# Altium footprint library Master.PcbLib: 178 footprints (part 9 of 12)
Each footprint in its own frame and in the unit in brackets; x right, y up, seen from the top. Pads: shape width x height; smd on the part's side, far side on the other; paste and mask are expansions set on the pad; w line width, h text height; cw(c..) or ccw(c..) is an arc to the next point about the centre after c.
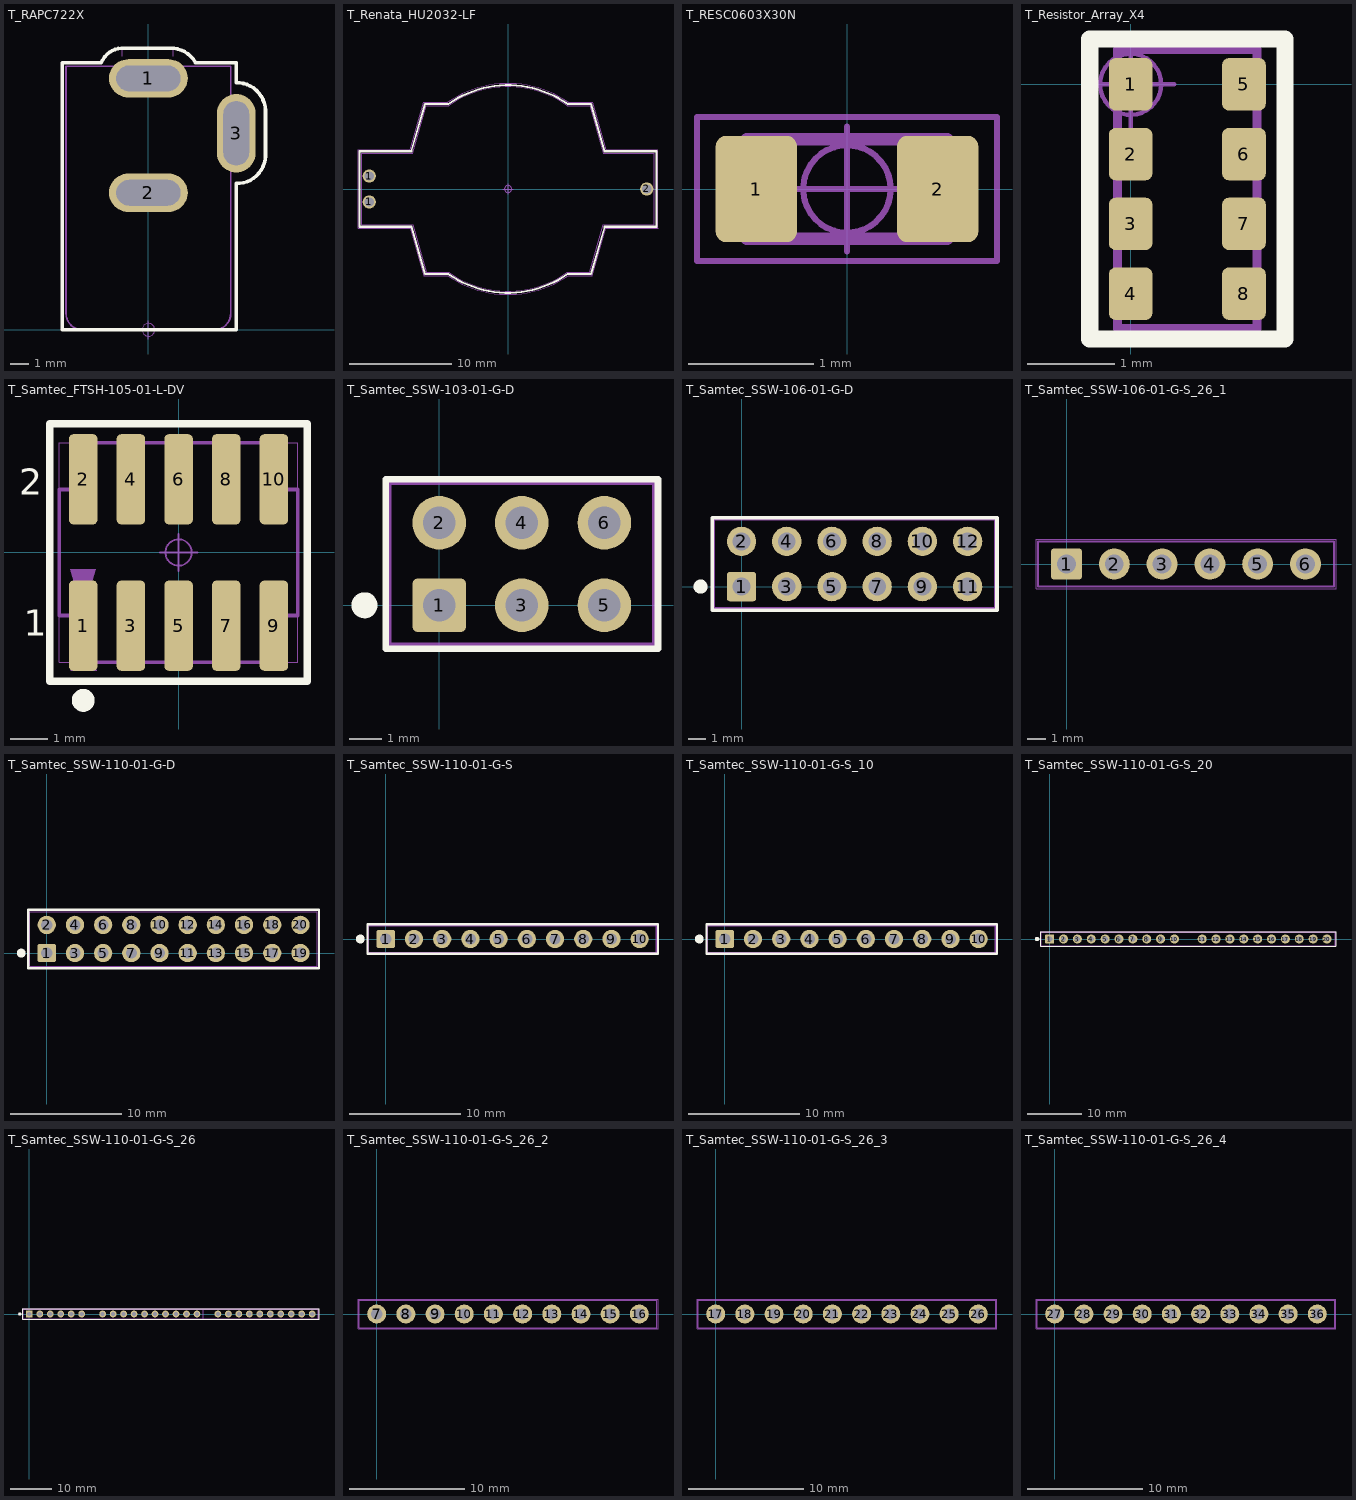
[diagram p8: the footprints below, top view; thin cyan lines are the x and y axes]

## T_RAPC722X [mm] "Connector, 2.1mm (Dia), 5.5mm(Dia), Round Power Socket"
height 10.7
pads (3):
  oval 4.3x2.1 hole 1.4 slot 3.5 at 0 deg: 1(0,13.74) 2(0,7.49)
  oval 2.1x4.3 hole 1.4 slot 3.5 at 90 deg: 3(4.8,10.74)
Top Overlay:
  lines w0.2: 1.196,15.393 -1.3,15.393 ccw(c-1.385,14.115) -2.569,14.6 -4.7,14.6 -4.7,0 4.79,0 4.79,8 ccw(c4.843,9.553) 6.396,9.499 6.396,11.996 ccw(c4.841,11.945) 4.79,13.5 4.79,14.59 4.78,14.6 2.569,14.6 ccw(c1.234,13.866) 1.2,15.388
Top Component Outline:
  lines w0.05: -1.332,15.393 1.164,15.393 ; -1.332,15.394 ccw(c-1.384,14.115) -2.568,14.6 -4.7,14.6 -4.7,0 4.8,0 4.8,8 ccw(c4.843,9.553) 6.396,9.499 6.396,11.996 ccw(c4.841,11.945) 4.8,13.5 4.8,14.6 2.568,14.6 ; 1.169,15.388 cw(c1.203,13.866) 2.537,14.6
Top 3D Body:
  lines w0.001: -1.432,14.95 -1.432,15.4 ; -1.4,13.95 -1.4,14.4 -4.5,14.4 -4.5,0.9 ccw(c-3.6,0.9) -3.6,0 3.6,0 ; 1.368,14.95 1.368,15.4 ; 1.4,13.95 1.4,14.4 4.5,14.4 4.5,0.9 cw(c3.6,0.9) 3.6,0
Top Component Center:
  circle w0.05: c0,0 r0.35
  lines w0.05: -0.5,0 0.5,0 ; 0,-0.5 0,0.5
Top Dimensions:
  lines w0.1: -4.5,0.9 ccw(c-3.6,0.9) -3.6,0 3.6,0 ccw(c3.6,0.9) 4.5,0.9 4.5,14.4 -4.5,14.4 -4.5,0.9
Top Assembly:
  text ".Designator" at -1.5,10.5 h0.75
3D body: height 10.7, standoff 0, extent -4.5,0 4.5,14.4
3D body: height 4, standoff -3.7, extent 4.5,9.45 4.7,11.85
3D body: height 4, standoff -3.7, extent -1.2,7.55 1.2,7.75
3D body: height 4, standoff -3.7, extent -1.4,13.55 1.4,13.75
3D body: height 9.59, standoff 3.21, extent -3.2,0 3.175,2
3D body: height 7.4, standoff 5.4, extent -1,0 0.992,2

## T_Renata_HU2032-LF [mm]
pads (3):
  round 1.3 hole 0.9: 1(-13.6,-1.27) 1(-13.6,1.27) 2(13.6,0)
Top Overlay:
  lines w0.2: -5.86,8.331 -8.133,8.331 -9.483,3.7 -14.55,3.7 -14.55,-3.7 ; -5.845,-8.331 -8.135,-8.331 -9.48,-3.7 -14.55,-3.7 ; -5.843,-8.33 ccw(c0,0) 5.839,-8.334 ; -5.839,8.334 cw(c0,0) 5.843,8.33 ; 5.845,8.331 8.135,8.331 9.48,3.7 14.55,3.7 ; 5.86,-8.331 8.133,-8.331 9.483,-3.7 14.55,-3.7 14.55,3.7 ; -14.55,-3.7 -14.55,-3.7 ; 14.55,3.7 14.55,3.7
Top Component Outline:
  lines w0.05: -14.702,-3.851 -14.702,3.849 -9.599,3.849 ; -14.7,-3.85 -9.599,-3.85 -8.252,-8.489 -5.895,-8.489 ccw(c0,0) 5.895,-8.489 8.252,-8.489 ; -9.599,3.849 -8.252,8.489 ; -8.252,8.489 -5.895,8.489 cw(c0,0) 5.895,8.489 8.252,8.489 9.599,3.85 14.7,3.85 14.7,-3.85 ; 8.252,-8.489 9.599,-3.849 ; 9.599,-3.849 14.702,-3.849
Top 3D Body:
  lines w0.01: -14.35,-3.5 -9.35,-3.5 -8,-8.15 -5.818,-8.15 ccw(c0,0) 5.818,-8.15 8,-8.15 9.35,-3.5 14.35,-3.5 14.35,3.5 9.35,3.5 8,8.15 5.818,8.15 ccw(c0,0) -5.818,8.15 -8,8.15 -9.35,3.5 -14.35,3.5 -14.35,-3.5
Top Component Center:
  circle w0.05: c0,0 r0.35
  lines w0.05: -0.5,0 0.5,0 ; 0,-0.5 0,0.5
Top Dimensions:
  lines w0.1: -14.35,-3.5 -9.35,-3.5 -8,-8.15 -5.818,-8.15 ccw(c0,0) 5.818,-8.15 8,-8.15 9.35,-3.5 14.35,-3.5 14.35,3.5 9.35,3.5 8,8.15 5.818,8.15 ccw(c0,0) -5.818,8.15 -8,8.15 -9.35,3.5 -14.35,3.5 -14.35,-3.5
Top Assembly:
  text ".Designator" at -1.75,10.7 h0.75
3D body "CircuitWorks-BATT HOLDER DIP (SMTU2032-LF).STEP": height 5.4, standoff -2, extent -14.25,-8.05 14.25,8.05
3D body "User Library-CR 2032 Lithium Cell.STEP": height 4.5, standoff 1.3, extent -10,-10 10,10

## T_RESC0603X30N [mm]
pads (2):
  rrect25% 0.65x0.85 smd: 1(-0.725,0) 2(0.725,0)
Top Component Outline:
  lines w0.05: -1.2,-0.575 1.2,-0.575 1.2,0.575 -1.2,0.575 -1.2,-0.575
Top 3D Body:
  lines w0.001: -0.8,-0.4 0.8,-0.4 0.8,0.4 -0.8,0.4 -0.8,-0.4
Top Component Center:
  circle w0.05: c0,0 r0.35
  lines w0.05: -0.5,0 0.5,0 ; 0,-0.5 0,0.5
Top Dimensions:
  lines w0.1: -0.8,-0.4 0.8,-0.4 0.8,0.4 -0.8,0.4 -0.8,-0.4
Top Assembly:
  text ".Designator" at -1.2,0.8 h0.75
3D body "User Library-RES_1609-0603.step": height 0.56, standoff 0, extent -0.85,-0.4 0.85,0.4

## T_Resistor_Array_X4 [mm]
pads (8):
  rrect30% 0.5x0.6 smd: 1(0,0) 2(0,-0.8) 3(0,-1.6) 4(0,-2.4) 5(1.3,0) 6(1.3,-0.8) 7(1.3,-1.6) 8(1.3,-2.4)
Top Overlay:
  lines w0.2: -0.47,-2.92 -0.47,0.52 1.77,0.52 1.77,-2.92 -0.47,-2.92
Top Component Outline:
  lines w0.05: -0.47,-2.92 -0.47,0.52 1.77,0.52 1.77,-2.92 -0.47,-2.92
Top 3D Body:
  lines w0.001: -0.15,-2.8 -0.15,0.4 1.45,0.4 1.45,-2.8 -0.15,-2.8
Top Component Center:
  circle w0.05: c0,0 r0.35
  lines w0.05: -0.5,0 0.5,0 ; 0,-0.5 0,0.5
Top Dimensions:
  lines w0.1: -0.15,-2.8 -0.15,0.4 1.45,0.4 1.45,-2.8 -0.15,-2.8
Top Assembly:
  text ".Designator" at -1,0.8 h0.75
3D body "User Library-R-0603-Array-4-1.STEP": height 0.51, standoff -0.01, extent -0.15,-2.8 1.45,0.4

## T_Samtec_FTSH-105-01-L-DV [mm]
pads (10):
  rrect30% 0.76x2.4 smd: 1(-2.54,-1.95) 2(-2.54,1.95) 3(-1.27,-1.95) 4(-1.27,1.95) 5(0,-1.95) 6(0,1.95) 7(1.27,-1.95) 8(1.27,1.95) 9(2.54,-1.95) 10(2.54,1.95)
Top Overlay:
  circle w0.4: c-2.54,-3.937 r0.105
  lines w0.2: -3.429,-3.429 3.429,-3.429 3.429,3.429 -3.429,3.429 -3.429,-3.429
  text "1" at -4.122,-2.215 h0.7
  text "2" at -4.249,1.544 h0.7
Top Component Outline:
  region: -2.185,-3.15 -2.525,-2.015 -2.865,-3.15
  lines w0.05: -3.429,-3.429 -3.429,3.429 3.429,3.429 3.429,-3.429 -3.429,-3.429
Top 3D Body:
  lines w0.001: -3.175,-2.921 3.175,-2.921 3.175,2.921 -3.175,2.921 -3.175,-2.921 ; -3.175,-1.675 -2.55,-1.675 -2.55,-2.925 2.53,-2.925 2.53,-1.675 3.175,-1.675 3.175,1.675 2.53,1.675 2.53,2.925 -2.55,2.925 -2.55,1.675 -3.175,1.675 -3.175,-1.675
Top Component Center:
  circle w0.05: c0,0 r0.35
  lines w0.05: -0.5,0 0.5,0 ; 0,-0.5 0,0.5
Top Dimensions:
  region: -2.89,-0.45 -2.55,-1.585 -2.21,-0.45
  lines w0.1: -3.175,-1.675 -2.55,-1.675 -2.55,-2.925 2.53,-2.925 2.53,-1.675 3.175,-1.675 3.175,1.675 2.53,1.675 2.53,2.925 -2.55,2.925 -2.55,1.675 -3.175,1.675 -3.175,-1.675
Top Assembly:
  text ".Designator" at -1.725,3.725 h0.75
3D body "FTSH-105-01-L-DV-K_2_14.stp": height 6.1, standoff -0.02, extent -3.175,-2.921 3.175,2.921

## T_Samtec_SSW-103-01-G-D [mm]
pads (6):
  rrect20% 1.65x1.65 hole 1: 1(0,0)
  round 1.65 hole 1: 2(0,2.54) 3(2.54,0) 4(2.54,2.54) 5(5.08,0) 6(5.08,2.54)
Top Overlay:
  circle w0.4: c-2.3,0 r0.2
  lines w0.2: -1.65,-1.33 6.73,-1.33 6.73,3.87 -1.65,3.87 -1.65,-1.33
Top Component Outline:
  lines w0.05: -1.625,-1.305 -1.625,3.845 6.705,3.845 6.705,-1.305 -1.625,-1.305
Top 3D Body:
  lines w0.001: -1.525,-1.205 -1.525,3.745 6.605,3.745 6.605,-1.205 -1.525,-1.205
Top Component Center:
  circle w0.05: c0,0 r0.35
  lines w0.05: -0.5,0 0.5,0 ; 0,-0.5 0,0.5
Top Dimensions:
  lines w0.1: -1.525,-1.2 6.6,-1.2 6.6,3.75 -1.525,3.75 -1.525,-1.2
Top Assembly:
  text ".Designator" at 0.875,4.225 h0.75
3D body "Samtec-SSW-103-01-G-D.step": height 8.52, standoff -2.63, extent -1.524,-1.206 6.604,3.747

## T_Samtec_SSW-106-01-G-D [mm]
pads (12):
  rrect20% 1.65x1.65 hole 1: 1(0,0)
  round 1.65 hole 1: 2(0,2.54) 3(2.54,0) 4(2.54,2.54) 5(5.08,0) 6(5.08,2.54) 7(7.62,0) 8(7.62,2.54) 9(10.16,0) 10(10.16,2.54) 11(12.7,0) 12(12.7,2.54)
Top Overlay:
  circle w0.4: c-2.3,0 r0.2
  lines w0.2: -1.65,-1.33 14.35,-1.33 14.35,3.87 -1.65,3.87 -1.65,-1.33
Top Component Outline:
  lines w0.05: -1.625,-1.305 -1.625,3.845 14.325,3.845 14.325,-1.305 -1.625,-1.305
Top 3D Body:
  lines w0.001: -1.525,-1.205 -1.525,3.745 14.225,3.745 14.225,-1.205 -1.525,-1.205
Top Component Center:
  circle w0.05: c0,0 r0.35
  lines w0.05: -0.5,0 0.5,0 ; 0,-0.5 0,0.5
Top Dimensions:
  lines w0.1: -1.525,-1.2 -1.525,3.75 14.225,3.75 14.225,-1.2 -1.525,-1.2
Top Assembly:
  text ".Designator" at 4.7,4.225 h0.75
3D body "Samtec-SSW-106-01-G-D.step": height 8.52, standoff -2.63, extent -1.524,-1.206 14.224,3.747

## T_Samtec_SSW-106-01-G-S_26_1 [mm]
pads (6):
  rrect20% 1.65x1.65 hole 1: 1(0,0)
  round 1.65 hole 1: 2(2.54,0) 3(5.08,0) 4(7.62,0) 5(10.16,0) 6(12.7,0)
Top Component Outline:
  lines w0.05: -1.625,-1.305 -1.625,1.305 14.326,1.305 14.326,-1.305 -1.625,-1.305
Top 3D Body:
  lines w0.001: -1.524,-1.206 -1.524,1.207 14.224,1.207 14.224,-1.206 -1.524,-1.206
Top Component Center:
  circle w0.05: c0,0 r0.35
  lines w0.05: -0.5,0 0.5,0 ; 0,-0.5 0,0.5
Top Dimensions:
  lines w0.1: -1.525,-1.2 14.224,-1.2 14.224,1.2 -1.525,1.2 -1.525,-1.2
Top Assembly:
  text ".Designator" at 5.08,1.905 h0.75
3D body "Samtec-SSW-106-01-G-S.step": height 8.52, standoff -2.63, extent -1.524,-1.206 14.224,1.207

## T_Samtec_SSW-110-01-G-D [mm]
pads (20):
  rrect20% 1.65x1.65 hole 1: 1(0,0)
  round 1.65 hole 1: 2(0,2.54) 3(2.54,0) 4(2.54,2.54) 5(5.08,0) 6(5.08,2.54) 7(7.62,0) 8(7.62,2.54) 9(10.16,0) 10(10.16,2.54) 11(12.7,0) 12(12.7,2.54) 13(15.24,0) 14(15.24,2.54) 15(17.78,0) 16(17.78,2.54) 17(20.32,0) 18(20.32,2.54) 19(22.86,0) 20(22.86,2.54)
Top Overlay:
  circle w0.4: c-2.3,0 r0.2
  lines w0.2: -1.675,-1.358 24.535,-1.358 24.535,3.897 -1.675,3.897 -1.675,-1.358
Top Component Outline:
  lines w0.05: -1.675,-1.358 -1.675,3.897 24.535,3.897 24.535,-1.358 -1.675,-1.358
Top 3D Body:
  lines w0.001: -1.524,-1.206 -1.524,3.747 24.384,3.747 24.384,-1.206 -1.524,-1.206
Top Component Center:
  circle w0.05: c0,0 r0.35
  lines w0.05: -0.5,0 0.5,0 ; 0,-0.5 0,0.5
Top Dimensions:
  lines w0.1: -1.524,-1.206 -1.524,3.747 24.384,3.747 24.384,-1.206 -1.524,-1.206
Top Assembly:
  text ".Designator" at 9.75,4.25 h0.75
3D body "Samtec-SSW-110-01-G-D.step": height 8.52, standoff -2.63, extent -1.524,-1.206 24.384,3.747

## T_Samtec_SSW-110-01-G-S [mm]
pads (10):
  rrect20% 1.65x1.65 hole 1: 1(0,0)
  round 1.65 hole 1: 2(2.54,0) 3(5.08,0) 4(7.62,0) 5(10.16,0) 6(12.7,0) 7(15.24,0) 8(17.78,0) 9(20.32,0) 10(22.86,0)
Top Overlay:
  circle w0.4: c-2.3,0 r0.2
  lines w0.2: -1.65,-1.33 24.511,-1.33 24.511,1.33 -1.65,1.33 -1.65,-1.33
Top Component Outline:
  lines w0.05: -1.625,-1.305 -1.625,1.305 24.511,1.305 24.511,-1.305 -1.625,-1.305
Top 3D Body:
  lines w0.001: -1.525,-1.205 -1.525,1.205 24.384,1.205 24.384,-1.205 -1.525,-1.205
Top Component Center:
  circle w0.05: c0,0 r0.35
  lines w0.05: -0.5,0 0.5,0 ; 0,-0.5 0,0.5
Top Dimensions:
  lines w0.1: -1.525,-1.2 24.375,-1.2 24.375,1.2 -1.525,1.2 -1.525,-1.2
Top Assembly:
  text ".Designator" at 9.8,1.675 h0.75
3D body "Samtec-SSW-110-01-G-P.step": height 8.52, standoff -2.63, extent -1.524,-1.206 24.384,1.207

## T_Samtec_SSW-110-01-G-S_10 [mm]
pads (10):
  rrect20% 1.65x1.65 hole 1: 1(0,0)
  round 1.65 hole 1: 2(2.54,0) 3(5.08,0) 4(7.62,0) 5(10.16,0) 6(12.7,0) 7(15.24,0) 8(17.78,0) 9(20.32,0) 10(22.86,0)
Top Overlay:
  circle w0.4: c-2.3,0 r0.2
  lines w0.2: -1.65,-1.33 24.511,-1.33 24.511,1.33 -1.65,1.33 -1.65,-1.33
Top Component Outline:
  lines w0.05: -1.625,-1.305 -1.625,1.305 24.511,1.305 24.511,-1.305 -1.625,-1.305
Top 3D Body:
  lines w0.001: -1.525,-1.205 -1.525,1.205 24.384,1.205 24.384,-1.205 -1.525,-1.205
Top Component Center:
  circle w0.05: c0,0 r0.35
  lines w0.05: -0.5,0 0.5,0 ; 0,-0.5 0,0.5
Top Dimensions:
  lines w0.1: -1.525,-1.2 24.375,-1.2 24.375,1.2 -1.525,1.2 -1.525,-1.2
Top Assembly:
  text ".Designator" at 9.8,1.675 h0.75
3D body "Samtec-SSW-110-01-G-P.step": height 8.52, standoff -2.63, extent -1.524,-1.206 24.384,1.207

## T_Samtec_SSW-110-01-G-S_20 [mm]
pads (20):
  rrect20% 1.65x1.65 hole 1: 1(0,0)
  round 1.65 hole 1: 2(2.54,0) 3(5.08,0) 4(7.62,0) 5(10.16,0) 6(12.7,0) 7(15.24,0) 8(17.78,0) 9(20.32,0) 10(22.86,0) 11(27.94,0) 12(30.48,0) 13(33.02,0) 14(35.56,0) 15(38.1,0) 16(40.64,0) 17(43.18,0) 18(45.72,0) 19(48.26,0) 20(50.8,0)
Top Overlay:
  circle w0.4: c-2.3,0 r0.2
  lines w0.2: -1.65,-1.33 -1.65,1.33 52.45,1.33 52.45,-1.33 -1.65,-1.33
Top Component Outline:
  lines w0.05: -1.625,-1.305 52.425,-1.305 52.425,1.305 -1.625,1.305 -1.625,-1.305
Top 3D Body:
  lines w0.001: -1.525,-1.205 52.325,-1.205 52.325,1.205 -1.525,1.205 -1.525,-1.205
Top Component Center:
  circle w0.05: c0,0 r0.35
  lines w0.05: -0.5,0 0.5,0 ; 0,-0.5 0,0.5
Top Dimensions:
  lines w0.1: -1.525,-1.2 -1.525,1.2 52.325,1.2 52.325,-1.2 -1.525,-1.2
Top Assembly:
  text ".Designator" at 23.7,1.675 h0.75
3D body "Samtec-SSW-110-01-G-P.step": height 8.52, standoff -2.63, extent 26.416,-1.206 52.324,1.207
3D body "Samtec-SSW-110-01-G-P.step": height 8.52, standoff -2.63, extent -1.524,-1.206 24.384,1.207

## T_Samtec_SSW-110-01-G-S_26 [mm]
pads (26):
  rrect20% 1.65x1.65 hole 1: 1(0,0)
  round 1.65 hole 1: 2(2.54,0) 3(5.08,0) 4(7.62,0) 5(10.16,0) 6(12.7,0) 7(17.78,0) 8(20.32,0) 9(22.86,0) 10(25.4,0) 11(27.94,0) 12(30.48,0) 13(33.02,0) 14(35.56,0) 15(38.1,0) 16(40.64,0) 17(45.72,0) 18(48.26,0) 19(50.8,0) 20(53.34,0) 21(55.88,0) 22(58.42,0) 23(60.96,0) 24(63.5,0) 25(66.04,0) 26(68.58,0)
Top Overlay:
  circle w0.4: c-2.3,0 r0.2
  lines w0.2: -1.65,-1.33 -1.65,1.33 70.231,1.33 70.231,-1.33 -1.65,-1.33
Top Component Outline:
  lines w0.05: -1.625,-1.305 70.206,-1.305 70.206,1.305 -1.625,1.305 -1.625,-1.305
Top 3D Body:
  lines w0.001: 42.165,-1.205 42.165,1.205 ; 52.325,-1.205 -1.525,-1.205 -1.525,1.205 52.325,1.205 ; 70.105,-1.205 70.105,1.205
Top Component Center:
  circle w0.05: c0,0 r0.35
  lines w0.05: -0.5,0 0.5,0 ; 0,-0.5 0,0.5
Top Dimensions:
  lines w0.1: -1.525,-1.2 -1.525,1.2 70.104,1.2 70.104,-1.2 -1.525,-1.2
Top Assembly:
  text ".Designator" at 27.534,1.778 h0.75
3D body "Samtec-SSW-106-01-G-S.step": height 8.52, standoff -2.63, extent -1.524,-1.206 14.224,1.207
3D body "Samtec-SSW-110-01-G-P.step": height 8.52, standoff -2.63, extent 44.196,-1.206 70.104,1.207
3D body "Samtec-SSW-110-01-G-P.step": height 8.52, standoff -2.63, extent 16.256,-1.206 42.164,1.207

## T_Samtec_SSW-110-01-G-S_26_2 [mm]
pads (10):
  round 1.65 hole 1: 7(0,0) 8(2.54,0) 9(5.08,0) 10(7.62,0) 11(10.16,0) 12(12.7,0) 13(15.24,0) 14(17.78,0) 15(20.32,0) 16(22.86,0)
Top Component Outline:
  lines w0.05: -1.626,-1.305 -1.626,1.305 24.486,1.305 24.486,-1.305 -1.626,-1.305
Top 3D Body:
  lines w0.001: 24.384,-1.205 -1.524,-1.205 -1.524,1.205 24.384,1.205 ; 24.385,-1.205 24.385,1.205
Top Component Center:
  circle w0.05: c0,0 r0.35
  lines w0.05: -0.5,0 0.5,0 ; 0,-0.5 0,0.5
Top Dimensions:
  lines w0.1: -1.524,-1.2 24.384,-1.2 24.384,1.2 -1.524,1.2 -1.524,-1.2
Top Assembly:
  text ".Designator" at 9.754,1.778 h0.75
3D body "Samtec-SSW-110-01-G-P.step": height 8.52, standoff -2.63, extent -1.524,-1.206 24.384,1.207

## T_Samtec_SSW-110-01-G-S_26_3 [mm]
pads (10):
  round 1.65 hole 1: 17(0,0) 18(2.54,0) 19(5.08,0) 20(7.62,0) 21(10.16,0) 22(12.7,0) 23(15.24,0) 24(17.78,0) 25(20.32,0) 26(22.86,0)
Top Component Outline:
  lines w0.05: -1.625,-1.305 -1.625,1.305 24.486,1.305 24.486,-1.305 -1.625,-1.305
Top 3D Body:
  lines w0.001: 24.384,1.205 -1.525,1.205 -1.525,-1.205 24.385,-1.205 24.385,1.205
Top Component Center:
  circle w0.05: c0,0 r0.35
  lines w0.05: -0.5,0 0.5,0 ; 0,-0.5 0,0.5
Top Dimensions:
  lines w0.1: -1.525,-1.2 24.384,-1.2 24.384,1.2 -1.525,1.2 -1.525,-1.2
Top Assembly:
  text ".Designator" at 10.16,1.905 h0.75
3D body "Samtec-SSW-110-01-G-P.step": height 8.52, standoff -2.63, extent -1.524,-1.206 24.384,1.207

## T_Samtec_SSW-110-01-G-S_26_4 [mm]
pads (10):
  round 1.65 hole 1: 27(0,0) 28(2.54,0) 29(5.08,0) 30(7.62,0) 31(10.16,0) 32(12.7,0) 33(15.24,0) 34(17.78,0) 35(20.32,0) 36(22.86,0)
Top Component Outline:
  lines w0.05: -1.625,-1.305 -1.625,1.305 24.486,1.305 24.486,-1.305 -1.625,-1.305
Top 3D Body:
  lines w0.001: 24.384,1.205 -1.525,1.205 -1.525,-1.205 24.385,-1.205 24.385,1.205
Top Component Center:
  circle w0.05: c0,0 r0.35
  lines w0.05: -0.5,0 0.5,0 ; 0,-0.5 0,0.5
Top Dimensions:
  lines w0.1: -1.525,-1.2 24.384,-1.2 24.384,1.2 -1.525,1.2 -1.525,-1.2
Top Assembly:
  text ".Designator" at 10.16,1.905 h0.75
3D body "Samtec-SSW-110-01-G-P.step": height 8.52, standoff -2.63, extent -1.524,-1.206 24.384,1.207